# Altium schematic symbol library TLV9034PWR.SchLib: 1 symbol
Pins are listed as number, name and electrical type; pins without a type are passive.

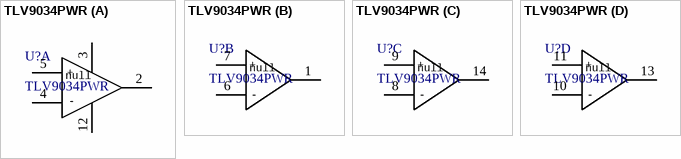
[diagram p0: symbol TLV9034PWR]

## TLV9034PWR
designator U?
High-performance, quad low-voltage push-pull comparator 14-TSSOP -40 to 125; Manufacturer_Name: Texas Instruments; TYPE: TYPE; RefDes: RefDes; Copyright: Copyright (C) 2026 Ultra Librarian. All rights reserved.; Manufacturer_Part_Number: TLV9034PWR; Datasheet: https://www.ti.com/lit/gpn/tlv9034
footprint PW0014A-IPC_A
part A pins: 2 OUT1, 3 V+ (power), 4 IN1- (hiz), 5 IN1+ (hiz), 12 V- (power)
part B pins: 1 OUT2, 6 IN2- (hiz), 7 IN2+ (hiz)
part C pins: 8 IN3- (hiz), 9 IN3+ (hiz), 14 OUT3
part D pins: 10 IN4- (hiz), 11 IN4+ (hiz), 13 OUT4
part A text: null; +; -
part B text: +; null; -
part C text: +; null; -
part D text: +; null; -